# Altium footprint library XTAL LSE.PcbLib: 1 footprints
Each footprint in its own frame and in the unit in brackets; x right, y up, seen from the top. Pads: shape width x height; smd on the part's side, far side on the other; paste and mask are expansions set on the pad; w line width, h text height; cw(c..) or ccw(c..) is an arc to the next point about the centre after c.
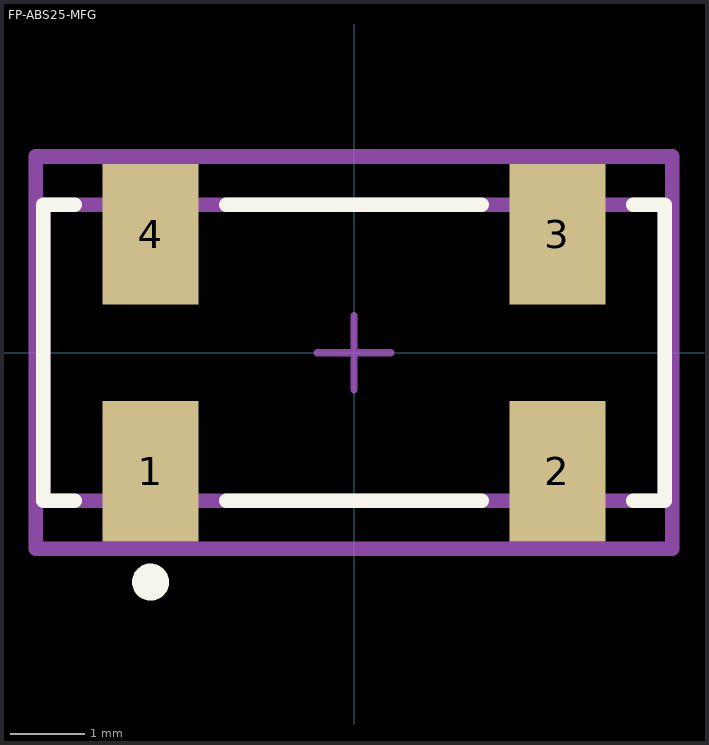
[diagram p0: the footprint, top view; thin cyan lines are the x and y axes]

## FP-ABS25-MFG [mm]
pads (4):
  rect 1.3x1.9 smd paste+0 mask+0: 1(-2.75,-1.6) 2(2.75,-1.6) 3(2.75,1.6) 4(-2.75,1.6)
Top Overlay:
  circle w0.25: c-2.75,-3.1 r0.125
  lines w0.2: -3.775,-2 -4.2,-2 -4.2,2 -3.775,2 ; -1.725,-2 1.725,-2 ; -1.725,2 1.725,2 ; 3.775,-2 4.2,-2 4.2,2 3.775,2
Top Assembly:
  lines w0.2: -4.3,-2.65 -4.3,2.65 4.3,2.65 4.3,-2.65 -4.3,-2.65
  text ".Designator" at 0,0.188 h1
Top 3D Body:
  lines w0.2: -4.2,-2 -4.2,2 4.2,2 4.2,-2 -4.2,-2
Top Courtyard:
  lines w0.2: -4.3,-2.65 -4.3,2.65 4.3,2.65 4.3,-2.65 -4.3,-2.65
Top Component Center:
  lines w0.1: -0.5,0 0.5,0 ; 0,-0.5 0,0.5
3D body "Crys_Abracon_ABS25-100_000KHZ-T_eec.STEP": height 0.25, standoff 0, extent -4.3,-2.65 4.3,2.65